# Altium footprint library Connectors.PcbLib: 60 footprints (part 1 of 4)
Each footprint in its own frame and in the unit in brackets; x right, y up, seen from the top. Pads: shape width x height; smd on the part's side, far side on the other; paste and mask are expansions set on the pad; w line width, h text height; cw(c..) or ccw(c..) is an arc to the next point about the centre after c.
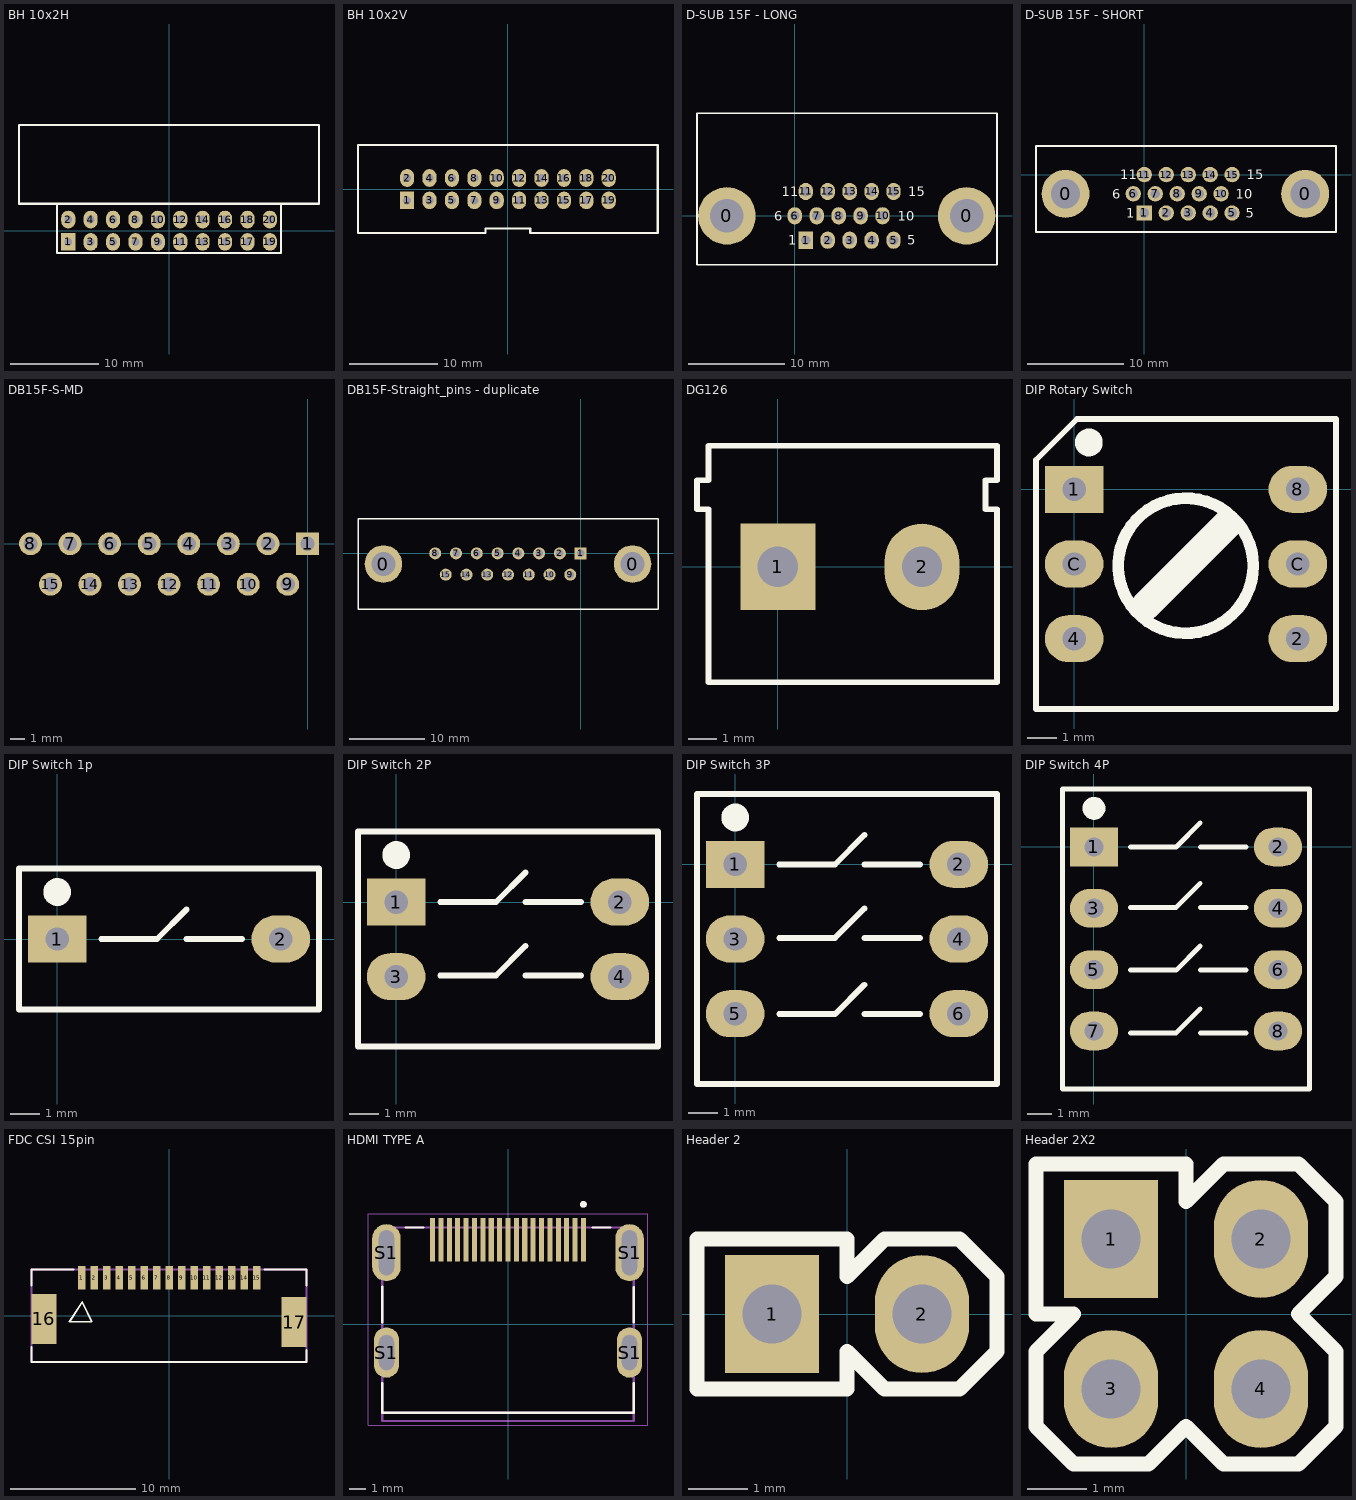
[diagram p0: the footprints below, top view; thin cyan lines are the x and y axes]

## BH 10x2H [mm]
pads (20):
  rect 1.6x2 hole 0.9: 1(-11.43,-1.27)
  oval 1.6x2 hole 0.9: 2(-11.43,1.27) 3(-8.89,-1.27) 4(-8.89,1.27) 5(-6.35,-1.27) 6(-6.35,1.27) 7(-3.81,-1.27) 8(-3.81,1.27) 9(-1.27,-1.27) 10(-1.27,1.27) 11(1.27,-1.27) 12(1.27,1.27) 13(3.81,-1.27) 14(3.81,1.27) 15(6.35,-1.27) 16(6.35,1.27) 17(8.89,-1.27) 18(8.89,1.27) 19(11.43,-1.27) 20(11.43,1.27)
Top Overlay:
  lines w0.254: -12.7,3.048 -12.7,-2.54 12.7,-2.54 12.7,3.048 ; -17.018,3.048 -17,3.048 17,3.048 17,12 -17.018,12 -17.018,3.048
3D body: height 8.98, standoff -2.37, extent -16.82,-1.596 16.82,11.964

## BH 10x2V [mm]
pads (20):
  rect 1.6x2 hole 0.9: 1(-11.43,-1.27)
  oval 1.6x2 hole 0.9: 2(-11.43,1.27) 3(-8.89,-1.27) 4(-8.89,1.27) 5(-6.35,-1.27) 6(-6.35,1.27) 7(-3.81,-1.27) 8(-3.81,1.27) 9(-1.27,-1.27) 10(-1.27,1.27) 11(1.27,-1.27) 12(1.27,1.27) 13(3.81,-1.27) 14(3.81,1.27) 15(6.35,-1.27) 16(6.35,1.27) 17(8.89,-1.27) 18(8.89,1.27) 19(11.43,-1.27) 20(11.43,1.27)
Top Overlay:
  lines w0.254: 17.009,-4.953 2.54,-4.953 2.54,-4.445 -2.54,-4.445 -2.54,-4.953 -17,-4.953 -17,5 17,5 17,-4.953 17.018,-4.953
3D body: height 8.75, standoff -3.1, extent -16.51,-4.375 16.51,4.725

## D-SUB 15F - LONG [mm]
height 12.55
pads (17):
  round 6 hole 3.5: 0(-7.075,0) 0(17.925,0)
  rect 1.5x1.8 hole 1: 1(1.145,-2.54)
  oval 1.5x1.8 hole 1: 2(3.435,-2.54) 3(5.725,-2.54) 4(8.015,-2.54) 5(10.305,-2.54) 6(0,0) 7(2.29,0) 8(4.58,0) 9(6.87,0) 10(9.16,0) 11(1.145,2.54) 12(3.435,2.54) 13(5.725,2.54) 14(8.015,2.54) 15(10.305,2.54)
Top Overlay:
  lines w0.2: -10.2,-5.1 -10.2,10.7 21.1,10.7 21.1,-5.1 -10.2,-5.1
  text "1" at -0.7,-3.04 h1
  text "5" at 11.75,-3.04 h1
  text "6" at -2.15,-0.5 h1
  text "10" at 10.725,-0.5 h1
  text "11" at -1.35,2.04 h1
  text "15" at 11.85,2.04 h1
Bottom Overlay:
  text "15" at 13.525,2.04 h1
  text "11" at -0.2,2.04 h1
  text "10" at 12.25,-0.5 h1
  text "6" at -1.475,-0.5 h1
  text "5" at 12.4,-3.04 h1
  text "1" at -0.375,-3.04 h1
3D body: height 12.57, standoff -4.71, extent -10.055,-4.92 20.945,17.3

## D-SUB 15F - SHORT [mm]
height 12.55
pads (17):
  round 5 hole 3.05: 0(-8.22,-2) 0(16.78,-2)
  rect 1.6x1.6 hole 1: 1(0,-4)
  round 1.6 hole 1: 2(2.29,-4) 3(4.58,-4) 4(6.87,-4) 5(9.16,-4) 6(-1.145,-2) 7(1.145,-2) 8(3.435,-2) 9(5.725,-2) 10(8.015,-2) 11(0,0) 12(2.29,0) 13(4.58,0) 14(6.87,0) 15(9.16,0)
Top Overlay:
  lines w0.2: -11.3,-6 -11.3,3 20,3 20,-6 -11.3,-6
  text "1" at -1.875,-4.5 h1
  text "5" at 10.575,-4.5 h1
  text "6" at -3.325,-2.5 h1
  text "10" at 9.55,-2.5 h1
  text "11" at -2.525,-0.5 h1
  text "15" at 10.675,-0.5 h1
Bottom Overlay:
  text "15" at 12.35,-0.5 h1
  text "11" at -1.375,-0.5 h1
  text "10" at 11.075,-2.5 h1
  text "6" at -2.65,-2.5 h1
  text "5" at 11.225,-4.5 h1
  text "1" at -1.55,-4.5 h1
3D body: height 12.57, standoff -3.47, extent -11.1,-6.1 19.71,9.15

## DB15F-S-MD [mm]
height 12.55
pads (15):
  rect 1.6x1.6 hole 1: 1(0,0)
  round 1.6 hole 1: 2(-2.768,0) 3(-5.54,0) 4(-8.31,0) 5(-11.08,0) 6(-13.85,0) 7(-16.62,0) 8(-19.39,0) 9(-1.384,-2.84) 10(-4.152,-2.84) 11(-6.92,-2.84) 12(-9.688,-2.84) 13(-12.456,-2.84) 14(-15.224,-2.84) 15(-17.992,-2.84)
3D body: height 12.5, standoff -3.22, extent -29.75,-8 10.25,5

## DB15F-Straight_pins - duplicate [mm]
height 12.55
pads (17):
  round 5 hole 3.25: 0(-26.296,-1.42) 0(6.92,-1.42)
  rect 1.6x1.6 hole 1: 1(0,0)
  round 1.6 hole 1: 2(-2.768,0) 3(-5.54,0) 4(-8.31,0) 5(-11.08,0) 6(-13.85,0) 7(-16.62,0) 8(-19.39,0) 9(-1.384,-2.84) 10(-4.152,-2.84) 11(-6.92,-2.84) 12(-9.688,-2.84) 13(-12.456,-2.84) 14(-15.224,-2.84) 15(-17.992,-2.84)
Top Overlay:
  lines w0.2: -29.688,-7.42 -29.688,4.58 10.312,4.58 10.312,-7.42 -29.688,-7.42
3D body: height 12, standoff -3.72, extent -29.75,-8 10.25,5

## DG126 [mm] "DG126 Port"
height 13
pads (2):
  rect 2.6x3 hole 1.4: 1(0,0)
  oval 2.6x3 hole 1.4: 2(5,0)
Top Overlay:
  lines w0.2: -2.8,2 -2.8,3 -2.4,3 -2.4,4.2 7.6,4.2 7.6,3 7.2,3 7.2,2 7.6,2 7.6,-4 -2.4,-4 -2.4,2 -2.8,2
3D body: height 10.2, standoff -2.2, extent -2.71,-3.8 7.54,4

## DIP Rotary Switch [mm]
height 7.2
pads (6):
  rect 2x1.6 hole 0.8: 1(0,0)
  oval 2x1.6 hole 0.8: 2(7.62,-5.08) 4(0,-5.08) 8(7.62,0) C(0,-2.54) C(7.62,-2.54)
Top Overlay:
  circle w0.4: c3.8,-2.6 r2.3
  circle w0.5: c0.5,1.6 r0.224
  lines w0.2: -1.3,-7.48 8.92,-7.48 8.92,2.4 0.1,2.4 -1.3,1 -1.3,-7.48
  lines w1: 2.45,-3.95 5.2,-1.2

## DIP Switch 1p [mm]
height 7.2
pads (2):
  rect 2x1.6 hole 0.8: 1(0,0)
  oval 2x1.6 hole 0.8: 2(7.62,0)
Top Overlay:
  circle w0.5: c0,1.6 r0.224
  lines w0.2: 1.5,0 3.4,0 4.4,1 ; 4.4,0 6.3,0 ; -1.3,-2.4 8.92,-2.4 8.92,2.4 -1.3,2.4 -1.3,-2.4

## DIP Switch 2P [mm]
height 7.2
pads (4):
  rect 2x1.6 hole 0.8: 1(0,0)
  oval 2x1.6 hole 0.8: 2(7.62,0) 3(0,-2.54) 4(7.62,-2.54)
Top Overlay:
  circle w0.5: c0,1.6 r0.224
  lines w0.2: 1.5,-2.5 3.4,-2.5 4.4,-1.5 ; 1.5,0 3.4,0 4.4,1 ; 4.4,-2.5 6.3,-2.5 ; 4.4,0 6.3,0 ; -1.3,-4.92 -1.3,2.4 8.92,2.4 8.92,-4.92 -1.3,-4.92

## DIP Switch 3P [mm]
height 7.2
pads (6):
  rect 2x1.6 hole 0.8: 1(0,0)
  oval 2x1.6 hole 0.8: 2(7.62,0) 3(0,-2.54) 4(7.62,-2.54) 5(0,-5.08) 6(7.62,-5.08)
Top Overlay:
  circle w0.5: c0,1.6 r0.224
  lines w0.2: 1.5,-5.1 3.4,-5.1 4.4,-4.1 ; 1.5,-2.5 3.4,-2.5 4.4,-1.5 ; 1.5,0 3.4,0 4.4,1 ; 4.4,-5.1 6.3,-5.1 ; 4.4,-2.5 6.3,-2.5 ; 4.4,0 6.3,0 ; -1.3,-7.48 -1.3,2.4 8.92,2.4 8.92,-7.48 -1.3,-7.48
3D body: height 7.1, standoff -3.2, extent -1.15,-7.19 8.75,1.99

## DIP Switch 4P [mm]
height 7.2
pads (8):
  rect 2x1.6 hole 0.8: 1(0,0)
  oval 2x1.6 hole 0.8: 2(7.62,0) 3(0,-2.54) 4(7.62,-2.54) 5(0,-5.08) 6(7.62,-5.08) 7(0,-7.62) 8(7.62,-7.62)
Top Overlay:
  circle w0.5: c0,1.6 r0.224
  lines w0.2: 1.5,-7.7 3.4,-7.7 4.4,-6.7 ; 1.5,-5.1 3.4,-5.1 4.4,-4.1 ; 1.5,-2.5 3.4,-2.5 4.4,-1.5 ; 1.5,0 3.4,0 4.4,1 ; 4.4,-7.7 6.3,-7.7 ; 4.4,-5.1 6.3,-5.1 ; 4.4,-2.5 6.3,-2.5 ; 4.4,0 6.3,0 ; -1.3,-10.02 -1.3,2.4 8.92,2.4 8.92,-10.02 -1.3,-10.02

## FDC CSI 15pin [mm]
pads (17):
  rect 0.6x1.9 smd paste+0 mask+0.102: 1(-7,3.05) 2(-6,3.05) 3(-5,3.05) 4(-4,3.05) 5(-3,3.05) 6(-2,3.05) 7(-1,3.05) 8(0,3.05) 9(1,3.05) 10(2,3.05) 11(3,3.05) 12(4,3.05) 13(5,3.05) 14(6,3.05) 15(7,3.05)
  rect 2x4 smd paste+0 mask+0.102: 16(-10,-0.25) 17(10,-0.5)
Top Overlay:
  lines w0.152: -10.998,-2.5 -10.998,-3.708 10.998,-3.708 10.998,-2.75 ; -10.998,2.413 -10.998,3.708 -7.62,3.708 ; 7.62,3.708 10.998,3.708 10.998,2.413 ; -7.955,-0.477 -6.939,1.098 -6.177,-0.477 -7.955,-0.477
Mechanical 13:
  lines w0.152: -11,-3.708 -11,3.708 10.998,3.708 10.998,-3.708 -11,-3.708
3D body: height 2, standoff 0, extent -10.025,-3.5 10.025,2.5

## HDMI TYPE A [mm]
height 6.58
pads (23):
  rect 0.3x2.6 smd paste+0 mask+0.05: 1(4.5,5.035) 2(4,5.035) 3(3.5,5.035) 4(3,5.035) 5(2.5,5.035) 6(2,5.035) 7(1.5,5.035) 8(1,5.035) 9(0.5,5.035) 10(0,5.035) 11(-0.5,5.035) 12(-1,5.035) 13(-1.5,5.035) 14(-2,5.035) 15(-2.5,5.035) 16(-3,5.035) 17(-3.5,5.035) 18(-4,5.035) 19(-4.5,5.035)
  oval 1.5x3 hole 0.9 slot 2.1 at 90 deg mask+0.102: S1(-7.25,-1.685) S1(7.25,-1.685)
  oval 1.7x3.4 hole 0.9 slot 2.7 at 90 deg mask+0.102: S1(-7.25,4.275) S1(7.25,4.275)
Top Overlay:
  circle w0.2: c4.5,7.155 r0.1
  lines w0.127: -7.5,-3.495 -7.5,-5.275 7.5,-5.275 7.5,-3.495 ; -7.5,0.125 -7.5,2.265 ; -6.11,5.775 -5.05,5.775 ; 5.05,5.775 6.11,5.775 ; 7.5,0.125 7.5,2.215
Mechanical 13:
  circle w0.2: c4.5,7.155 r0.1
  lines w0.127: -7.5,-5.275 -7.5,5.775 7.5,5.775 7.5,-5.27 7.5,-5.275 ; -7.5,-5.275 -7.5,-5.775 7.5,-5.775 7.5,-5.275 ; -7.5,-5.275 7.5,-5.275
Mechanical 15:
  lines w0.05: -8.35,-6.025 -8.35,6.585 8.35,6.585 8.35,-6.025 -8.35,-6.025
3D body: height 6.18, standoff -2.1, extent -7.5,-5.75 7.5,6.25

## Header 2 [mm]
pads (2):
  rect 1.6x2 hole 1: 1(-1.27,0)
  oval 1.6x2 hole 1: 2(1.27,0)
Top Overlay:
  lines w0.254: -2.54,-1.27 0,-1.27 0,-0.635 0.635,-1.27 1.905,-1.27 2.54,-0.635 2.54,0.635 1.905,1.27 0.635,1.27 0,0.635 0,1.27 -2.54,1.27 -2.54,-1.27
3D body: height 9.4, standoff -3, extent -2.413,-1.251 2.667,1.245

## Header 2X2 [mm]
pads (4):
  rect 1.6x2 hole 1: 1(-1.27,1.27)
  oval 1.6x2 hole 1: 2(1.27,1.27) 3(-1.27,-1.27) 4(1.27,-1.27)
Top Overlay:
  lines w0.254: -2.54,-1.905 -1.905,-2.54 -0.635,-2.54 0,-1.905 0.635,-2.54 1.905,-2.54 2.54,-1.905 2.54,-0.635 1.905,0 2.54,0.635 2.54,1.905 1.905,2.54 0.635,2.54 0,1.905 0,2.54 -2.54,2.54 -2.54,0 -1.905,0 -2.54,-0.635 -2.54,-1.905
3D body: height 8.5, standoff -3, extent -2.54,-2.413 2.54,2.667